# Altium footprint library SOIC-8_L4.9-W3.9-P1.27.PcbLib: 1 footprints
Each footprint in its own frame and in the unit in brackets; x right, y up, seen from the top. Pads: shape width x height; smd on the part's side, far side on the other; paste and mask are expansions set on the pad; w line width, h text height; cw(c..) or ccw(c..) is an arc to the next point about the centre after c.
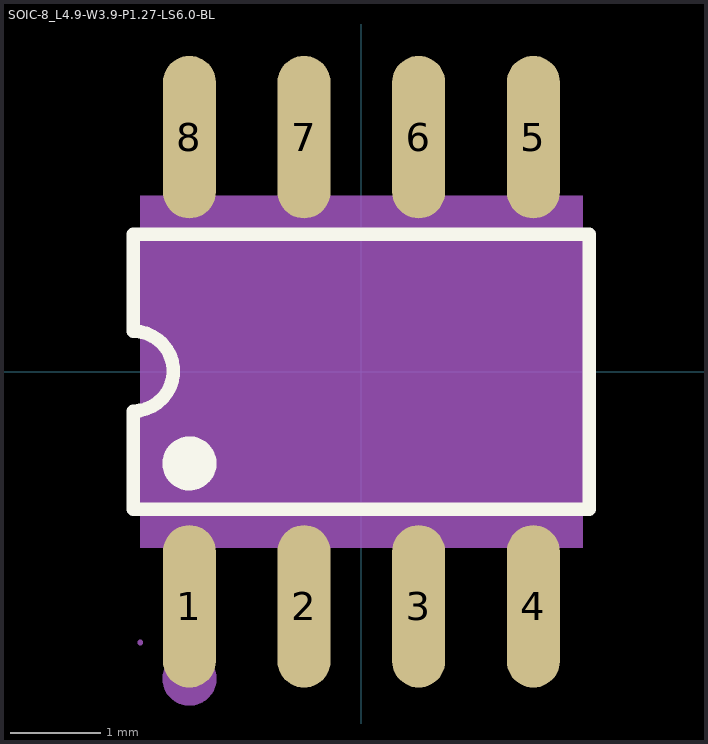
[diagram p0: the footprint, top view; thin cyan lines are the x and y axes]

## SOIC-8_L4.9-W3.9-P1.27-LS6.0-BL [mm]
pads (8):
  oval 0.588x1.8 smd paste+0 mask+0.051: 1(-1.905,-2.6) 2(-0.635,-2.6) 3(0.635,-2.6) 4(1.905,-2.6) 5(1.905,2.6) 6(0.635,2.6) 7(-0.635,2.6) 8(-1.905,2.6)
Top Overlay:
  circle w0.3: c-1.905,-1.016 r0.15
  lines w0.15: -2.068,-1.521 -2.526,-1.521 ; -2.068,1.521 -2.526,1.521 ; -1.742,-1.521 -0.798,-1.521 ; -1.742,1.521 -0.798,1.521 ; -0.472,-1.521 0.472,-1.521 ; -0.472,1.521 0.472,1.521 ; 0.798,-1.521 1.742,-1.521 ; 0.798,1.521 1.742,1.521 ; 2.068,-1.521 2.526,-1.521 ; 2.068,1.521 2.526,1.521 ; -2.526,-1.521 -2.526,-0.435 ccw(c-2.526,0.007) -2.526,0.449 -2.526,1.521 ; -2.526,-1.521 2.526,-1.521 ; -2.526,1.521 2.526,1.521 ; 2.526,-1.521 2.526,1.521
Mechanical 6:
  circle w0.3: c-1.905,-3.4 r0.15
Mechanical 7:
  region: -2.45,-1.95 -2.45,1.95 2.45,1.95 2.45,-1.95
Mechanical 8:
  region: -2.42,-3 -2.42,-3.012 -2.438,-3.03 -2.462,-3.03 -2.48,-3.012 -2.48,-3 -2.48,-2.988 -2.462,-2.97 -2.438,-2.97 -2.42,-2.988 -2.42,-3
Mechanical 9:
  region: 1.695,3 1.695,2.165 2.115,2.165 2.115,3
  region: 0.425,3 0.425,2.165 0.845,2.165 0.845,3
  region: -0.845,3 -0.845,2.165 -0.425,2.165 -0.425,3
  region: -2.115,3 -2.115,2.165 -1.695,2.165 -1.695,3
  region: 1.695,-3 1.695,-2.165 2.115,-2.165 2.115,-3
  region: 0.425,-3 0.425,-2.165 0.845,-2.165 0.845,-3
  region: -0.845,-3 -0.845,-2.165 -0.425,-2.165 -0.425,-3
  region: -2.115,-3 -2.115,-2.165 -1.695,-2.165 -1.695,-3
Mechanical 10:
  region: 1.695,2.175 1.695,1.94 2.115,1.94 2.115,2.175
  region: 0.425,2.175 0.425,1.94 0.845,1.94 0.845,2.175
  region: -0.845,2.175 -0.845,1.94 -0.425,1.94 -0.425,2.175
  region: -2.115,2.175 -2.115,1.94 -1.695,1.94 -1.695,2.175
  region: 1.695,-2.175 1.695,-1.94 2.115,-1.94 2.115,-2.175
  region: 0.425,-2.175 0.425,-1.94 0.845,-1.94 0.845,-2.175
  region: -0.845,-2.175 -0.845,-1.94 -0.425,-1.94 -0.425,-2.175
  region: -2.115,-2.175 -2.115,-1.94 -1.695,-1.94 -1.695,-2.175